# Altium integrated library LM293DT.IntLib: 1 symbol
Pins are listed as number, name and electrical type; pins without a type are passive.

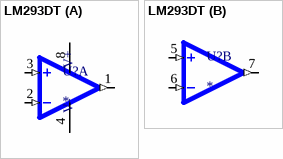
[diagram p0: symbol LM293DT]

## LM293DT
designator U?
Comparator Standard (General Purpose) Open-Collector, Open-Drain, Rail-to-Rail 8-SOIC; MF: STMicroelectronics; MP: LM293DT; SnapEDA_Link: https://www.snapeda.com/parts/LM293DT/STMicroelectronics/view-part/?ref=snap; Package: SOIC-8 STMicroelectronics; Value: *; Check_prices: https://www.snapeda.com/parts/LM293DT/STMicroelectronics/view-part/?ref=eda
footprint SOIC127P600X175-8N
part A pins: 1 OUT (out), 2 -IN (in), 3 +IN (in), 4 V- (power), 8 V+ (power)
part B pins: 5 +IN (in), 6 -IN (in), 7 OUT (out)